# Altium footprint library QFN50P400X400X90-25N.PcbLib: 1 footprints
Each footprint in its own frame and in the unit in brackets; x right, y up, seen from the top. Pads: shape width x height; smd on the part's side, far side on the other; paste and mask are expansions set on the pad; w line width, h text height; cw(c..) or ccw(c..) is an arc to the next point about the centre after c.
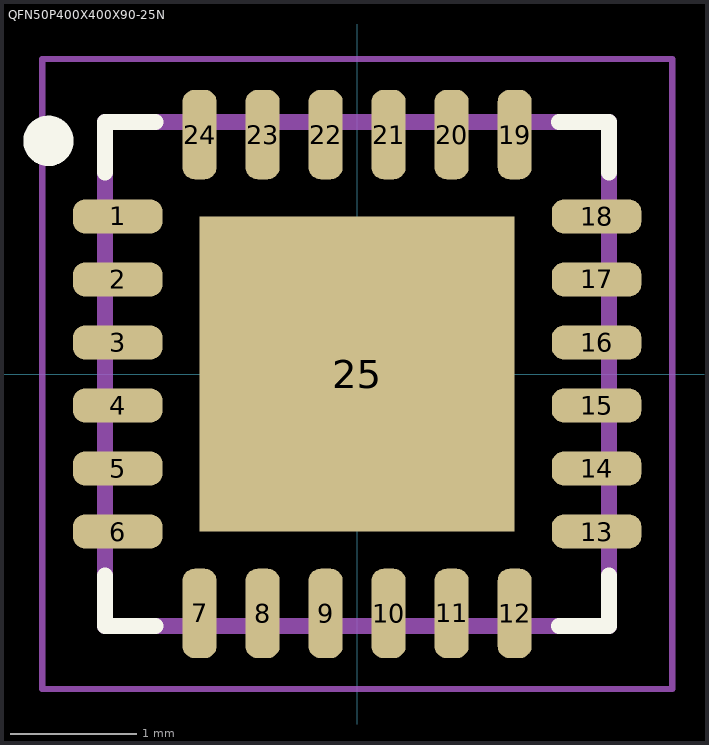
[diagram p0: the footprint, top view; thin cyan lines are the x and y axes]

## QFN50P400X400X90-25N [mm]
pads (25):
  rrect70% 0.71x0.27 smd paste+0 mask+0.102: 1(-1.9,1.25) 2(-1.9,0.75) 3(-1.9,0.25) 4(-1.9,-0.25) 5(-1.9,-0.75) 6(-1.9,-1.25) 13(1.9,-1.25) 14(1.9,-0.75) 15(1.9,-0.25) 16(1.9,0.25) 17(1.9,0.75) 18(1.9,1.25)
  rrect70% 0.27x0.71 smd paste+0 mask+0.102: 7(-1.25,-1.9) 8(-0.75,-1.9) 9(-0.25,-1.9) 10(0.25,-1.9) 11(0.75,-1.9) 12(1.25,-1.9) 19(1.25,1.9) 20(0.75,1.9) 21(0.25,1.9) 22(-0.25,1.9) 23(-0.75,1.9) 24(-1.25,1.9)
  rect 2.5x2.5 smd paste-2 mask+0.102: 25(0,0)
Top Overlay:
  circle w0.2: c-2.45,1.85 r0.1
  lines w0.127: -2,-1.6 -2,-2 -1.6,-2 ; -2,1.6 -2,2 -1.6,2 ; 1.6,-2 2,-2 2,-1.6 ; 1.6,2 2,2 2,1.6
Top Paste:
  region: -0.1,0.1 -1.101,0.1 -1.101,1.1 -0.1,1.1
  region: 1.1,0.1 0.1,0.1 0.1,1.1 1.1,1.1
  region: 1.1,-1.101 0.1,-1.101 0.1,-0.1 1.1,-0.1
  region: -0.1,-1.101 -1.101,-1.101 -1.101,-0.1 -0.1,-0.1
Assembly Top:
  lines w0.127: -2,-2 -2,2 2,2 2,-2 -2,-2
Courtyard Top:
  lines w0.05: -2.5,-2.5 -2.5,2.5 2.5,2.5 2.5,-2.5 -2.5,-2.5
3D body "step_temp.STEP": height 1, standoff 0, extent -2,-2 2,2